# Altium schematic symbol library DIODE,ESD,12V,DFN1006-2A.Schlib: 1 symbol
Pins are listed as number, name and electrical type; pins without a type are passive.

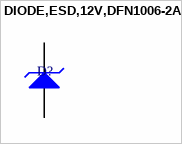
[diagram p0: symbol DIODE,ESD,12V,DFN1006-2A]

## DIODE,ESD,12V,DFN1006-2A
designator D?
pins: 1 A, 2 K